# Altium schematic symbol library CF14JT470R.SchLib: 1 symbol
Pins are listed as number, name and electrical type; pins without a type are passive.

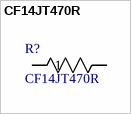
[diagram p0: symbol CF14JT470R]

## CF14JT470R
designator R?
Description; Manufacturer_Name: Stackpole International; Copyright: Copyright (C) 2026 Ultra Librarian. All rights reserved.; Manufacturer_Part_Number: CF14JT470R
footprint STA_CF14_STP
pins: 1, 2